# Altium footprint library Capacitance.PcbLib: 69 footprints (part 2 of 5)
Each footprint in its own frame and in the unit in brackets; x right, y up, seen from the top. Pads: shape width x height; smd on the part's side, far side on the other; paste and mask are expansions set on the pad; w line width, h text height; cw(c..) or ccw(c..) is an arc to the next point about the centre after c.
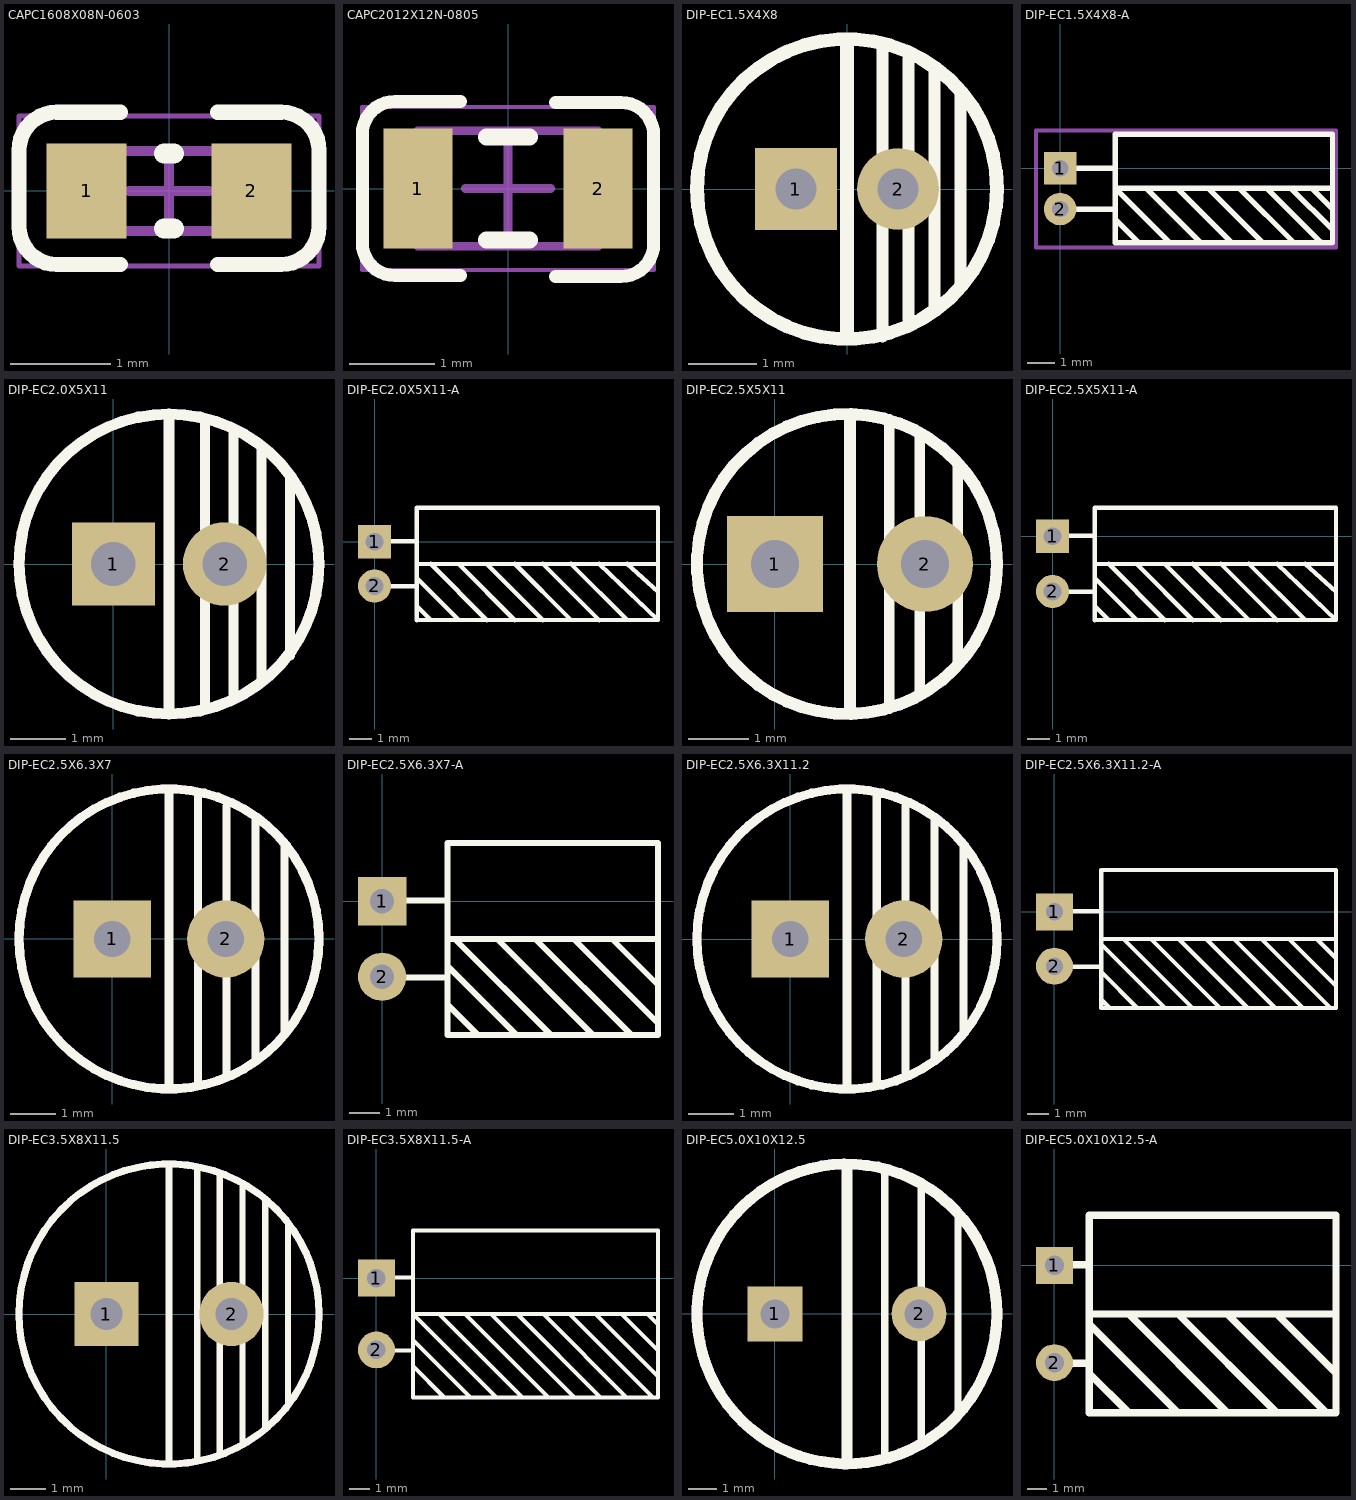
[diagram p1: the footprints below, top view; thin cyan lines are the x and y axes]

## CAPC1608X08N-0603 [mm] "Chip Capacitor, 2-Leads, Body 1.60x0.80mm, IPC Medium Density"
height 0.8
pads (2):
  rect 0.8x0.95 smd: 1(-0.825,0) 2(0.825,0)
Top Overlay:
  lines w0.152: -0.484,-0.737 -1.119,-0.737 cw(c-1.119,-0.356) -1.5,-0.356 -1.5,0.406 cw(c-1.119,0.406) -1.119,0.787 -0.992,0.787 -0.484,0.787 ; 0.484,-0.737 1.119,-0.737 ccw(c1.119,-0.356) 1.5,-0.356 1.5,0.406 ccw(c1.119,0.406) 1.119,0.787 0.484,0.787
  lines w0.2: -0.05,-0.375 0.05,-0.375 ; -0.05,0.375 0.05,0.375
Top Value:
  text "'.Comment'" at -2.797,-0.377 h1.3
Top Designator:
  text "'.Designator'" at -3.709,-0.271 h1.3
Top Courtyard:
  lines w0.05: -1.5,-0.75 -1.5,0.75 1.5,0.75 1.5,-0.75 -1.5,-0.75
  lines w0.1: -0.4,0 0.4,0 ; 0,-0.4 0,0.4
Top Assembly:
  lines w0.1: -0.8,-0.4 -0.8,0.4 0.8,0.4 0.8,-0.4 -0.8,-0.4
3D body "C0603C100C3GACTU.stp": height 0.87, standoff 0, extent -0.8,-0.4 0.8,0.4

## CAPC2012X12N-0805 [mm] "Chip Capacitor, 2-Leads, Body 2.00x1.25mm, IPC Medium Density"
height 1.25
pads (2):
  rect 0.8x1.4 smd: 1(-1.05,0) 2(1.05,0)
Top Overlay:
  lines w0.152: -0.557,-1.016 -1.319,-1.016 cw(c-1.319,-0.635) -1.7,-0.635 -1.7,0.635 cw(c-1.319,0.635) -1.319,1.016 -0.557,1.016 ; 0.557,-1.028 1.319,-1.028 ccw(c1.319,-0.647) 1.7,-0.647 1.7,0.496 1.7,0.623 ccw(c1.319,0.623) 1.319,1.004 0.557,1.004
  lines w0.2: -0.25,-0.6 0.25,-0.6 ; -0.25,0.6 0.25,0.6
Top Value:
  text "'.Comment'" at -3.449,-0.465 h1.6
Top Designator:
  text "'.Designator'" at -4.573,-0.334 h1.6
Top Courtyard:
  lines w0.05: -1.7,-0.95 -1.7,0.95 1.7,0.95 1.7,-0.95 -1.7,-0.95
  lines w0.1: -0.5,0 0.5,0 ; 0,-0.5 0,0.5
Top Assembly:
  lines w0.1: -1.05,-0.675 -1.05,0.675 1.05,0.675 1.05,-0.675 -1.05,-0.675
3D body "C0805C100J5GACTU.stp": height 0.88, standoff 0, extent -1,-0.625 1,0.625

## DIP-EC1.5X4X8 [mm]
pads (2):
  rect 1.2x1.2 hole 0.6: 1(-0.75,0)
  round 1.2 hole 0.6: 2(0.75,0)
Top Overlay:
  circle w0.2: c0,0 r2.2
  lines w0.178: 0.52,-2.159 0.52,2.032 ; 0.901,-1.905 0.901,1.905 ; 1.282,-1.778 1.282,1.778 ; 1.663,-1.397 1.663,1.397
  lines w0.2: 0,-2.159 0,-2 0,2.159
Bottom Courtyard:
  circle w0.102: c0,0 r2.2
  text ".Designator" at 7.618,-0.508 h1.52
3D body "CAP 1.5X4X8.STEP": height 8.04, standoff -3.46, extent -2.01,-1.966 2.01,2.032

## DIP-EC1.5X4X8-A [mm]
pads (2):
  rect 1.2x1.2 hole 0.6: 1(0,0)
  round 1.2 hole 0.6: 2(0,-1.5)
Top Overlay:
  lines w0.2: 0,-1.5 2,-1.5 ; 0,0 2,0 ; 2.032,-1.881 2.889,-2.738 2.921,-2.738 ; 2.921,-1.627 2.032,-0.738 ; 3.175,-0.738 5.175,-2.738 5.207,-2.738 ; 4.064,-2.738 4.032,-2.738 2.032,-0.738 ; 4.318,-0.738 6.318,-2.738 6.35,-2.738 ; 5.461,-0.738 7.461,-2.738 7.493,-2.738 ; 6.604,-0.738 8.604,-2.738 8.636,-2.738 ; 7.62,-0.738 9.597,-2.715 ccw(c9.652,-2.661) 9.652,-2.738 ; 8.509,-0.738 10.031,-2.26 cw(c10.03,-2.262) 10.032,-2.262 ; 9.271,-0.738 10.031,-1.498 cw(c10.03,-1.5) 10.032,-1.5 ; 10.032,-0.738 2.032,-0.738 ; 2.032,-2.738 10.032,-2.738 10.032,1.262 2.032,1.262 2.032,-2.738
Bottom Courtyard:
  lines w0.152: -0.889,-2.921 -0.889,1.397 10.16,1.397 10.16,-2.921 -0.889,-2.921
  text ".Designator" at 12.253,-1.27 h1.52
3D body "CAP 1.5X4X8-H.STEP": height 4.02, standoff -3.48, extent -0.254,-2.772 9.996,1.248

## DIP-EC2.0X5X11 [mm]
pads (2):
  rect 1.5x1.5 hole 0.8: 1(0,0)
  round 1.5 hole 0.8: 2(2,0)
Top Overlay:
  circle w0.2: c1,0 r2.7
  lines w0.178: 1.651,-2.54 1.651,2.54 ; 2.159,-2.413 2.159,2.413 ; 2.667,-2.032 2.667,2.032 ; 3.175,-1.651 3.175,1.524
  lines w0.2: 1,-2.667 1,-2 1,2.667
Bottom Courtyard:
  circle w0.2: c1,0 r2.7
  text ".Designator" at 8.618,-0.508 h1.52
3D body "CAP 2.0X5X11.STEP": height 11.04, standoff -3.42, extent -1.524,-2.5 3.486,2.5

## DIP-EC2.0X5X11-A [mm]
pads (2):
  rect 1.5x1.5 hole 0.8: 1(0,0)
  round 1.5 hole 0.8: 2(0,-2)
Top Overlay:
  lines w0.2: 0.762,-2.016 1.905,-2.016 ; 0.762,0.016 1.905,0.016 ; 1.905,-2.905 2.54,-3.54 ; 1.905,-1.635 3.81,-3.54 ; 1.905,-1.006 12.827,-1 ; 2.54,-1 5.08,-3.548 ; 3.81,-1.005 6.35,-3.547 ; 5.08,-1.004 7.62,-3.545 ; 6.35,-1 8.89,-3.54 ; 7.62,-1.003 10.16,-3.543 ; 8.89,-1.002 11.43,-3.541 ; 10.16,-1.001 12.827,-3.54 ; 11.43,-1.001 12.827,-2.27 ; 12.827,-3.54 12.827,1.54 1.905,1.54 1.905,-3.552 12.827,-3.54
Bottom Courtyard:
  text ".Designator" at 13.67,-1.514 h1.52
3D body "CAP 2.0X5X11-H.STEP": height 5.02, standoff -3.48, extent -0.254,-3.521 12.956,1.489

## DIP-EC2.5X5X11 [mm]
pads (2):
  rect 1.6x1.6 hole 0.8: 1(0,0)
  round 1.6 hole 0.8: 2(2.5,0)
Top Overlay:
  circle w0.2: c1.2,0 r2.5
  lines w0.178: 1.905,-2.413 1.905,2.413 ; 2.413,-2.159 2.413,2.159 ; 3.048,-1.651 3.048,1.651
  lines w0.2: 1.25,-2.489 1.25,2.413
Bottom Courtyard:
  circle w0.2: c1.2,0 r2.5
  text ".Designator" at 8.818,-0.508 h1.52
3D body "CAP 2.5X5X11.STEP": height 11.03, standoff -3.43, extent -1.255,-2.586 3.755,2.413

## DIP-EC2.5X5X11-A [mm]
pads (2):
  rect 1.5x1.5 hole 0.8: 1(0,0)
  round 1.5 hole 0.8: 2(0,-2.5)
Top Overlay:
  lines w0.2: 0.762,-2.516 1.905,-2.516 ; 0.762,0.016 1.905,0.016 ; 1.905,-3.155 2.54,-3.79 ; 1.905,-1.885 3.81,-3.79 ; 1.905,-1.256 12.827,-1.25 ; 2.54,-1.25 5.08,-3.798 ; 3.81,-1.255 6.35,-3.797 ; 5.08,-1.254 7.62,-3.795 ; 6.35,-1.25 8.89,-3.79 ; 7.62,-1.253 10.16,-3.793 ; 8.89,-1.252 11.43,-3.791 ; 10.16,-1.251 12.827,-3.79 ; 11.43,-1.251 12.827,-2.52 ; 12.827,-3.79 1.905,-3.802 1.905,1.29 12.827,1.29 12.827,-3.79
Bottom Courtyard:
  text ".Designator" at 13.669,-1.764 h1.52
3D body "CAP 2.5X5X11-H.STEP": height 5.02, standoff -3.48, extent -0.255,-3.74 12.955,1.27

## DIP-EC2.5X6.3X7 [mm]
pads (2):
  rect 1.7x1.7 hole 0.8: 1(0,0)
  round 1.7 hole 0.8: 2(2.5,0)
Top Overlay:
  circle w0.2: c1.25,0 r3.3
  lines w0.178: 1.885,-3.175 1.885,3.175 ; 2.52,-3.048 2.52,2.921 ; 3.155,-2.667 3.155,2.667 ; 3.79,-2.032 3.79,2.032
  lines w0.2: 1.25,-3.302 1.25,3.251
Bottom Courtyard:
  circle w0.2: c1.25,0 r3.3
  text ".Designator" at 8.868,-0.509 h1.52
3D body "CAP 2.5X6.3X7.STEP": height 7.03, standoff -3.38, extent -2.032,-3.149 4.278,3.149

## DIP-EC2.5X6.3X7-A [mm]
pads (2):
  rect 1.6x1.6 hole 0.8: 1(0,0)
  round 1.6 hole 0.8: 2(0,-2.5)
Top Overlay:
  lines w0.2: 0.762,-2.52 2.159,-2.52 ; 0.762,0.02 2.159,0.02 ; 2.159,-3.409 3.175,-4.425 ; 2.159,-2.139 4.445,-4.425 ; 2.159,-1.25 9.144,-1.25 ; 2.413,-1.25 5.588,-4.425 5.715,-4.425 ; 3.81,-1.25 6.985,-4.425 ; 5.08,-1.25 8.255,-4.425 ; 6.35,-1.25 9.144,-4.044 ; 7.62,-1.25 9.144,-2.774 ; 2.159,-4.425 9.144,-4.425 9.144,1.925 2.159,1.925 2.159,-4.425
Bottom Courtyard:
  text ".Designator" at 11.789,-1.758 h1.52
3D body "CAP 2.5X6.3X7-H.STEP": height 6.32, standoff -3.48, extent -0.287,-4.385 8.923,1.925

## DIP-EC2.5X6.3X11.2 [mm]
pads (2):
  rect 1.7x1.7 hole 0.8: 1(0,0)
  round 1.7 hole 0.8: 2(2.5,0)
Top Overlay:
  circle w0.2: c1.25,0 r3.3
  lines w0.178: 1.905,-3.175 1.905,3.175 ; 2.54,-2.921 2.54,2.921 ; 3.175,-2.667 3.175,2.667 ; 3.81,-2.032 3.81,2.032
  lines w0.2: 1.25,-3.226 1.25,3.277
Bottom Courtyard:
  circle w0.2: c1.25,0 r3.3
  text ".Designator" at 8.868,-0.508 h1.52
3D body "CAP 2.5X6.3X11.2.STEP": height 11.23, standoff -3.38, extent -1.905,-3.15 4.405,3.15

## DIP-EC2.5X6.3X11.2-A [mm]
pads (2):
  rect 1.7x1.7 hole 0.8: 1(0,0)
  round 1.7 hole 0.8: 2(0,-2.5)
Top Overlay:
  lines w0.2: 0.635,-2.52 2.159,-2.52 ; 0.635,0.02 2.032,0.02 ; 2.159,-4.044 2.54,-4.425 ; 2.159,-2.774 3.81,-4.425 ; 2.159,-1.504 5.08,-4.425 4.953,-4.425 ; 2.159,-1.25 12.954,-1.25 ; 3.175,-1.25 6.35,-4.425 ; 4.445,-1.25 7.62,-4.425 ; 5.715,-1.25 8.89,-4.425 ; 6.985,-1.25 10.16,-4.425 ; 8.255,-1.25 11.43,-4.425 ; 9.525,-1.25 12.7,-4.425 ; 10.795,-1.25 12.954,-3.409 ; 12.065,-1.25 12.954,-2.139 ; 2.159,-4.425 2.159,1.925 12.954,1.925 12.954,-4.425 2.159,-4.425
Bottom Courtyard:
  text ".Designator" at 7.491,-0.635 h1.52
3D body "CAP 2.5X6.3X11.2-H.STEP": height 6.32, standoff -3.48, extent -0.254,-4.425 13.156,1.885

## DIP-EC3.5X8X11.5 [mm]
pads (2):
  rect 1.8x1.8 hole 0.9: 1(0,0)
  round 1.8 hole 0.9: 2(3.5,0)
Top Overlay:
  circle w0.2: c1.75,0 r4.2
  lines w0.178: 2.54,-4.064 2.54,4.064 ; 3.175,-3.937 3.175,3.937 ; 3.81,-3.556 3.81,3.556 ; 4.445,-3.175 4.445,3.175 ; 5.08,-2.54 5.08,2.54
  lines w0.2: 1.75,-4.191 1.75,4 1.75,4.191
Bottom Courtyard:
  circle w0.2: c1.75,0 r4.2
  text ".Designator" at 9.368,-0.508 h1.52
3D body "CAP 3.5X8X11.5.STEP": height 11.53, standoff -3.38, extent -2.255,-3.999 5.755,4

## DIP-EC3.5X8X11.5-A [mm]
pads (2):
  rect 1.8x1.8 hole 0.9: 1(0,0)
  round 1.8 hole 0.9: 2(0,-3.5)
Top Overlay:
  lines w0.2: 0.762,-3.528 1.778,-3.528 ; 0.762,0.028 1.778,0.028 ; 1.778,-4.29 3.302,-5.814 ; 1.778,-3.02 4.572,-5.814 ; 3.048,-1.75 7.112,-5.814 ; 4.318,-1.75 8.382,-5.814 ; 5.588,-1.75 9.652,-5.814 ; 5.842,-5.814 1.778,-1.75 13.716,-1.75 ; 6.858,-1.75 10.922,-5.814 ; 8.128,-1.75 12.192,-5.814 ; 9.398,-1.75 13.462,-5.814 ; 10.668,-1.75 13.716,-4.798 ; 11.938,-1.75 13.716,-3.528 ; 13.208,-1.75 13.716,-2.258 ; 1.778,-5.814 13.716,-5.814 13.716,2.314 1.778,2.314 1.778,-5.814
Bottom Courtyard:
  text ".Designator" at 14.025,-2.258 h1.52
3D body "CAP 3.5X8X11.5-H.STEP": height 8.03, standoff -2.62, extent -0.381,-5.783 13.329,2.227

## DIP-EC5.0X10X12.5 [mm]
pads (2):
  rect 1.9x1.9 hole 1: 1(0,0)
  round 1.9 hole 1: 2(5,0)
Top Overlay:
  circle w0.381: c2.5,0 r5.2
  lines w0.254: 3.81,-5.08 3.81,4.826 ; 5.08,-4.572 5.08,4.572 ; 6.35,-3.556 6.35,3.302
  lines w0.381: 2.5,-5.207 2.5,5.08
Bottom Courtyard:
  circle w0.381: c2.5,0 r5.2
  text ".Designator" at 10.118,-0.511 h1.52
3D body "CAP 5.0X10X12.5.STEP": height 12.55, standoff -3.36, extent -2.413,-4.999 7.597,4.999

## DIP-EC5.0X10X12.5-A [mm]
pads (2):
  rect 1.9x1.9 hole 1: 1(0,0)
  round 1.9 hole 1: 2(0,-5)
Top Overlay:
  lines w0.381: 0.762,-5.04 1.778,-5.04 ; 0.762,0.04 1.778,0.04 ; 1.778,-5.548 3.81,-7.58 ; 1.778,-3.008 6.35,-7.58 ; 1.778,-2.5 14.41,-2.5 ; 3.81,-2.5 8.89,-7.58 ; 6.35,-2.5 11.43,-7.58 ; 8.89,-2.5 13.97,-7.58 ; 11.43,-2.5 14.478,-5.548 ; 1.778,-7.58 1.778,2.58 14.478,2.58 14.478,-7.58 1.778,-7.58
Bottom Courtyard:
  text ".Designator" at 14.426,-3.008 h1.52
3D body "CAP 5.0X10X12.5-H.STEP": height 10.03, standoff -3.47, extent -0.381,-7.545 14.329,2.465